# Altium footprint library Diode.PcbLib: 35 footprints (part 1 of 3)
Each footprint in its own frame and in the unit in brackets; x right, y up, seen from the top. Pads: shape width x height; smd on the part's side, far side on the other; paste and mask are expansions set on the pad; w line width, h text height; cw(c..) or ccw(c..) is an arc to the next point about the centre after c.
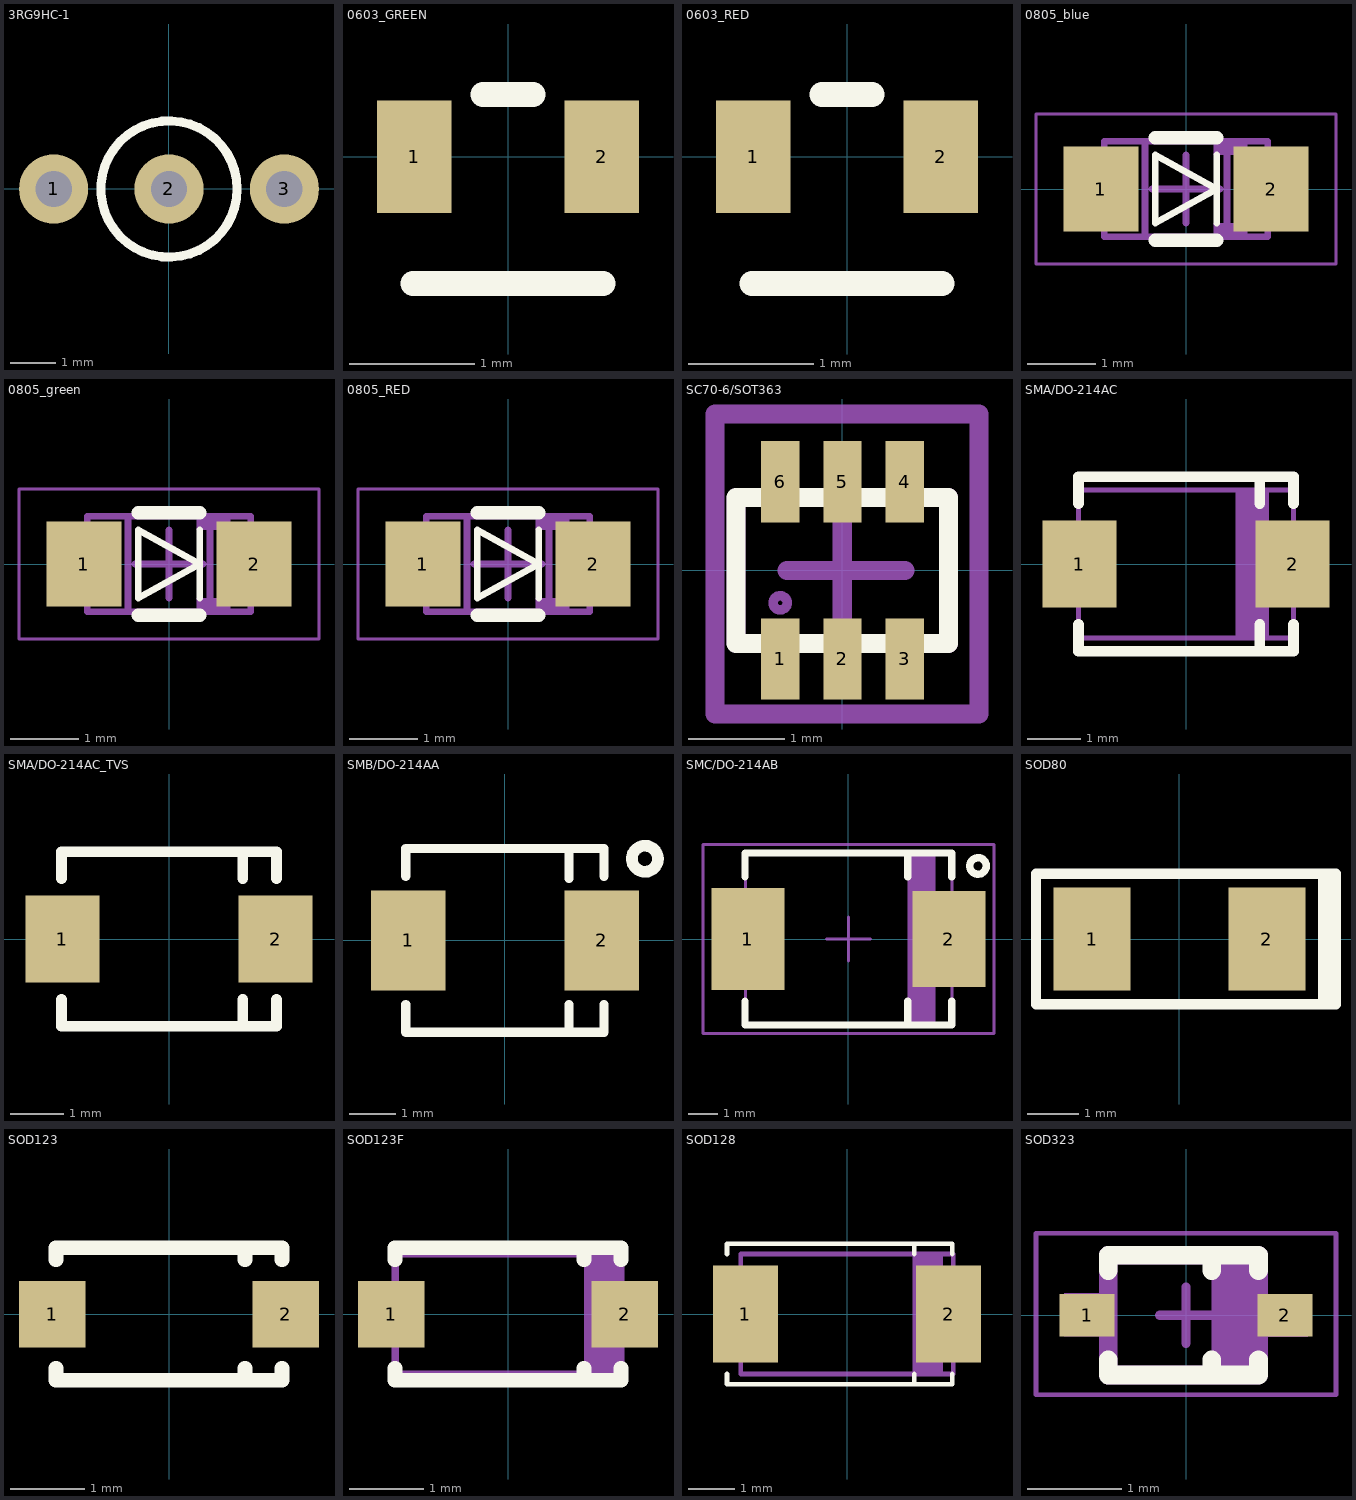
[diagram p0: the footprints below, top view; thin cyan lines are the x and y axes]

## 3RG9HC-1 [mil] "3RG9HC-1"
pads (3):
  round 60 hole 31.5: 1(-100,0) 2(0,0) 3(100,0)
Top Overlay:
  circle w7.87: c0,0 r59.06
3D body "led 3mm 3 pin v2.step": height 272.15, standoff -235.72, extent -113.77,-66.93 113.79,78.74

## 0603_GREEN [mm]
pads (2):
  rect 0.6x0.9 smd: 1(-0.75,0) 2(0.75,0)
Top Overlay:
  lines w0.2: -0.762,-1.016 0.762,-1.016 ; -0.2,0.5 0.2,0.5
3D body "led0603_GRE.step": height 0.81, standoff 0.01, extent -0.81,-0.846 0.81,0.254

## 0603_RED [mm]
pads (2):
  rect 0.6x0.9 smd: 1(-0.75,0) 2(0.75,0)
Top Overlay:
  lines w0.2: -0.762,-1.016 0.762,-1.016 ; -0.2,0.5 0.2,0.5
3D body "led0603_RED.step": height 0.81, standoff 0.01, extent -0.81,-0.846 0.81,0.254

## 0805_blue [mm]
pads (2):
  rect 1.1x1.25 smd: 1(-1.25,0) 2(1.25,0)
Top Overlay:
  lines w0.1: 0.45,-0.5 0.45,0.5 ; -0.45,-0.5 0.45,0 -0.45,0.5 -0.45,-0.5
  lines w0.2: -0.45,-0.75 0.45,-0.75 ; -0.45,0.75 0.45,0.75
Top Assembly (Mech13):
  rectangle: 0.4,-0.7 0.9,-0.5
  rectangle: 0.4,0.5 0.9,0.7
  lines w0.1: -0.6,-0.7 -0.6,0.7 ; 0.6,-0.7 0.6,0.7 ; -1.2,-0.7 -1.2,-0.2 ccw(c-1.2,0) -1.2,0.2 -1.2,0.7 1.2,0.7 1.2,0.2 ccw(c1.2,0) 1.2,-0.2 1.2,-0.7 -1.2,-0.7
  text ".Designator" at -1.15,0.883 h0.4
Mechanical 15:
  lines w0.05: -2.2,-1.1 -2.2,1.1 2.2,1.1 2.2,-1.1 -2.2,-1.1
  lines w0.1: -0.5,0 0.5,0 ; 0,-0.5 0,0.5
3D body "Blue_0805.step": height 0.81, standoff 0.01, extent -1.05,-0.675 1.05,0.675

## 0805_green [mm]
pads (2):
  rect 1.1x1.25 smd: 1(-1.25,0) 2(1.25,0)
Top Overlay:
  lines w0.1: 0.45,-0.5 0.45,0.5 ; -0.45,-0.5 -0.45,0.5 0.45,0 -0.45,-0.5
  lines w0.2: -0.45,-0.75 0.45,-0.75 ; -0.45,0.75 0.45,0.75
Top Assembly (Mech13):
  rectangle: 0.4,0.5 0.9,0.7
  rectangle: 0.4,-0.7 0.9,-0.5
  lines w0.1: -0.6,-0.7 -0.6,0.7 ; 0.6,-0.7 0.6,0.7 ; -1.2,-0.7 1.2,-0.7 1.2,-0.2 cw(c1.2,0) 1.2,0.2 1.2,0.7 -1.2,0.7 -1.2,0.2 cw(c-1.2,0) -1.2,-0.2 -1.2,-0.7
  text ".Designator" at -1.15,0.883 h0.4
Mechanical 15:
  lines w0.05: -2.2,-1.1 2.2,-1.1 2.2,1.1 -2.2,1.1 -2.2,-1.1
  lines w0.1: -0.5,0 0.5,0 ; 0,-0.5 0,0.5
3D body "Green_0805.step": height 1.11, standoff 0.01, extent -1.01,-0.625 1.01,0.625

## 0805_RED [mm]
pads (2):
  rect 1.1x1.25 smd: 1(-1.25,0) 2(1.25,0)
Top Overlay:
  lines w0.1: 0.45,-0.5 0.45,0.5 ; -0.45,-0.5 0.45,0 -0.45,0.5 -0.45,-0.5
  lines w0.2: -0.45,-0.75 0.45,-0.75 ; -0.45,0.75 0.45,0.75
Top Assembly (Mech13):
  rectangle: 0.4,-0.7 0.9,-0.5
  rectangle: 0.4,0.5 0.9,0.7
  lines w0.1: -0.6,-0.7 -0.6,0.7 ; 0.6,-0.7 0.6,0.7 ; -1.2,-0.7 -1.2,-0.2 ccw(c-1.2,0) -1.2,0.2 -1.2,0.7 1.2,0.7 1.2,0.2 ccw(c1.2,0) 1.2,-0.2 1.2,-0.7 -1.2,-0.7
  text ".Designator" at -1.999,-0.133 h0.4
Mechanical 15:
  lines w0.05: -2.2,-1.1 -2.2,1.1 2.2,1.1 2.2,-1.1 -2.2,-1.1
  lines w0.1: -0.5,0 0.5,0 ; 0,-0.5 0,0.5
3D body "Red_0805.step": height 0.92, standoff 0.01, extent -1.05,-0.675 1.05,0.675

## SC70-6/SOT363 [mm]
pads (6):
  rect 0.4x0.85 smd: 1(-0.65,-0.925) 2(0,-0.925) 3(0.65,-0.925) 4(0.65,0.925) 5(0,0.925) 6(-0.65,0.925)
Top Overlay:
  lines w0.2: -1.112,-0.762 1.108,-0.762 1.108,0.762 -1.112,0.762 -1.112,-0.762
Top Assembly (Mech13):
  circle w0.1: c-0.65,-0.339 r0.074
  region: -0.502,1.048 -0.824,1.048 -0.824,0.762 -0.502,0.762
  region: 0.148,1.048 -0.174,1.048 -0.174,0.762 0.148,0.762
  region: 0.798,1.048 0.476,1.048 0.476,0.762 0.798,0.762
  rectangle: 0.502,-1.048 0.824,-0.762
  rectangle: -0.148,-1.048 0.174,-0.762
  rectangle: -0.798,-1.048 -0.476,-0.762
  lines w0.2: -1.112,-0.762 -1.112,0.762 1.108,0.762 1.108,-0.762 -1.112,-0.762
  text ".Designator" at -2.499,-0.167 h0.5
Mechanical 15:
  lines w0.2: -0.576,0 0.65,0 ; -0.002,-0.762 -0.002,0.762 ; -1.33,-1.499 1.425,-1.499 1.425,1.633 -1.33,1.633 -1.33,-1.499
3D body "User Library-SC70-6.step": height 0.91, standoff -0.04, extent -1,-1.05 1,1.05

## SMA/DO-214AC [mm]
pads (2):
  rect 1.4x1.64 smd: 1(-2.015,0) 2(2.015,0)
Top Overlay:
  lines w0.2: -2.032,-1.143 -2.032,-1.651 2.032,-1.651 2.032,-1.143 ; -2.032,1.143 -2.032,1.651 2.032,1.651 2.032,1.143 ; 1.397,-1.651 1.397,-1.143 ; 1.397,1.143 1.397,1.651
Top Assembly (Mech13):
  region: -2.032,0.5 -2.582,0.5 -2.582,-0.5 -2.032,-0.5
  rectangle: 2.032,-0.5 2.582,0.5
  rectangle: 0.933,-1.397 1.568,1.397
  lines w0.1: 1.397,-1.397 1.397,1.397 ; -2.032,-1.397 -2.032,1.397 2.032,1.397 2.032,-1.397 -2.032,-1.397
  text ".Designator" at -2.498,-0.167 h0.5
3D body "SMA_DO-214AC.step": height 2.56, standoff -0.01, extent -2.75,-1.4 2.75,1.4

## SMA/DO-214AC_TVS [mm]
pads (2):
  rect 1.4x1.64 smd: 1(-2.015,0) 2(2.015,0)
Top Overlay:
  lines w0.2: -2.032,-1.143 -2.032,-1.651 2.032,-1.651 2.032,-1.143 ; -2.032,1.143 -2.032,1.651 2.032,1.651 2.032,1.143 ; 1.397,-1.651 1.397,-1.143 ; 1.397,1.143 1.397,1.651
Top Assembly (Mech13):
  text ".Designator" at -2.498,-0.167 h0.5
3D body "SMA_DO-214AC.step": height 2.56, standoff -0.01, extent -2.75,-1.4 2.75,1.4

## SMB/DO-214AA [mm]
pads (2):
  rect 1.62x2.18 smd: 1(-2.11,0) 2(2.11,0)
Top Overlay:
  circle w0.254: c3.048,1.778 r0.284
  lines w0.2: -2.159,-1.397 -2.159,-2 2.159,-2 2.159,-1.397 ; -2.159,1.397 -2.159,2 2.159,2 2.159,1.397 ; 1.397,-2 1.397,-1.397 ; 1.397,1.349 1.397,1.953
Top Assembly (Mech13):
  text ".Designator" at -2.498,-0.167 h0.5
3D body "SMB_DO-214AA.step": height 2.47, standoff -0.32, extent -2.742,-1.95 2.907,1.95

## SMC/DO-214AB [mm]
pads (2):
  rect 2.5x3.5 smd: 1(-3.45,0)
  rect 2.5x3.3 smd: 2(3.45,0)
Top Overlay:
  circle w0.254: c4.449,2.508 r0.284
  lines w0.25: -3.55,-2.138 -3.55,-2.95 3.55,-2.95 3.55,-2.138 ; -3.55,2.138 -3.55,2.95 3.55,2.95 3.55,2.138 ; 2.032,-2.95 2.032,-2.138 ; 2.032,2.138 2.032,2.95
Top Assembly (Mech13):
  rectangle: 2.032,-2.95 2.983,2.95
  rectangle: -3.93,-1.337 -3.57,1.337
  region: 3.892,1.341 3.531,1.341 3.531,-1.332 3.892,-1.332
  lines w0.1: -3.541,-2.95 3.55,-2.95 3.55,2.95 -3.541,2.95 -3.541,-2.95
  text ".Designator" at -2.498,-0.167 h0.5
Mechanical 15:
  lines w0.1: -0.75,0 0.75,0 ; 0,-0.75 0,0.75 ; -5,-3.25 -5,3.25 5,3.25 5,-3.25 -5,-3.25
3D body "DO-214AB-SMC.step": height 2.4, standoff -0.05, extent -3.9,-2.95 3.9,2.95

## SOD80 [mm]
pads (2):
  rect 1.5x2 smd: 1(-1.7,0) 2(1.7,0)
Top Overlay:
  lines w0.2: 2.794,0.381 2.794,-1.27 ; 2.794,-1.27 -2.794,-1.27 -2.794,1.27 2.794,1.27 ; 2.794,-1.27 2.794,1.27 ; 2.794,-1.27 3.048,-1.27 3.048,1.27 ; 2.794,-1.27 2.921,-1.143 2.921,0.508 2.921,1.143 3.048,1.27 ; 2.794,1.27 3.048,1.27
3D body "SOD80_MiniMelf.step": height 1.6, standoff 0, extent -1.82,-0.8 1.88,0.8

## SOD123 [mm]
pads (2):
  rect 0.9x0.9 smd: 1(-1.575,0) 2(1.575,0)
Top Overlay:
  lines w0.2: -1.524,-0.726 -1.524,-0.889 1.524,-0.889 1.524,-0.726 ; -1.524,0.737 -1.524,0.9 1.524,0.9 1.524,0.737 ; 1.024,-0.889 1.024,-0.726 ; 1.024,0.737 1.024,0.9
3D body "SOD123-1.step": height 1.18, standoff 0, extent -1.95,-0.9 1.95,0.9

## SOD123F [mm]
pads (2):
  rect 0.9x0.9 smd: 1(-1.575,0) 2(1.575,0)
Top Overlay:
  lines w0.2: -1.524,-0.726 -1.524,-0.889 1.524,-0.889 1.524,-0.726 ; -1.524,0.737 -1.524,0.9 1.524,0.9 1.524,0.737 ; 1.024,-0.889 1.024,-0.726 ; 1.024,0.737 1.024,0.9
Top Assembly (Mech13):
  rectangle: 1.024,-0.807 1.524,0.819
  rectangle: 1.5,-0.25 1.75,0.25
  region: -1.5,0.25 -1.75,0.25 -1.75,-0.25 -1.5,-0.25
  lines w0.1: -1.524,-0.807 -1.524,0.819 1.524,0.819 1.524,-0.807 -1.524,-0.807
  text ".Designator" at -1.999,-0.133 h0.4
3D body "sot123F.step": height 0.89, standoff 0, extent -1.753,-0.8 1.753,0.8

## SOD128 [mm]
pads (2):
  rect 1.4x2.1 smd: 1(-2.2,0) 2(2.2,0)
Top Overlay:
  lines w0.1: -2.6,-1.3 -2.6,-1.525 2.284,-1.525 2.284,-1.3 ; -2.6,1.3 -2.6,1.525 2.284,1.525 2.284,1.3 ; 1.456,-1.525 1.456,-1.3 ; 1.456,1.3 1.456,1.525
Top Assembly (Mech13):
  region: -2.3,0.932 -2.6,0.932 -2.6,-0.932 -2.3,-0.932
  rectangle: 2.3,-0.932 2.6,0.932
  rectangle: 1.419,-1.3 2.08,1.3
  lines w0.1: -2.3,-1.3 -2.3,1.3 0,1.3 ; -2.3,-1.3 0,-1.3 ; -2.3,-1.3 0,-1.3 ; 0,-1.3 2.3,-1.3 2.3,1.3 ; 0,1.3 2.3,1.3 ; 0,1.3 2.3,1.3
  text ".Designator" at -1.999,-0.133 h0.4
3D body "SOD128.step": height 1.1, standoff 0, extent -2.6,-1.35 2.6,1.35

## SOD323 [mm]
pads (2):
  rect 0.59x0.45 smd: 1(-1.055,0) 2(1.055,0)
Top Overlay:
  lines w0.2: -0.829,-0.476 -0.829,-0.639 0.774,-0.639 0.774,-0.476 ; -0.829,0.476 -0.829,0.639 0.774,0.639 0.774,0.476 ; 0.274,-0.639 0.274,-0.476 ; 0.274,0.476 0.274,0.639
Top Assembly (Mech13):
  region: 1.3,0.225 0.829,0.225 0.829,-0.234 1.3,-0.234
  rectangle: -1.3,-0.225 -0.829,0.234
  rectangle: 0.274,-0.639 0.774,0.639
  lines w0.2: -0.829,-0.639 -0.829,0.639 0.774,0.639 0.774,-0.639 -0.829,-0.639
  text ".Designator" at -2.524,1.058 h0.5
Mechanical 15:
  lines w0.05: -1.6,-0.85 -1.6,0.875 1.6,0.875 1.6,-0.85 -1.6,-0.85
  lines w0.1: -0.28,0 0.274,0 ; 0,-0.3 0,0.3
3D body "SOD-323.step": height 1.1, standoff 0, extent -1.3,-0.675 1.3,0.675